# Altium schematic symbol library Connectors.SchLib: 110 symbols (part 2 of 2)
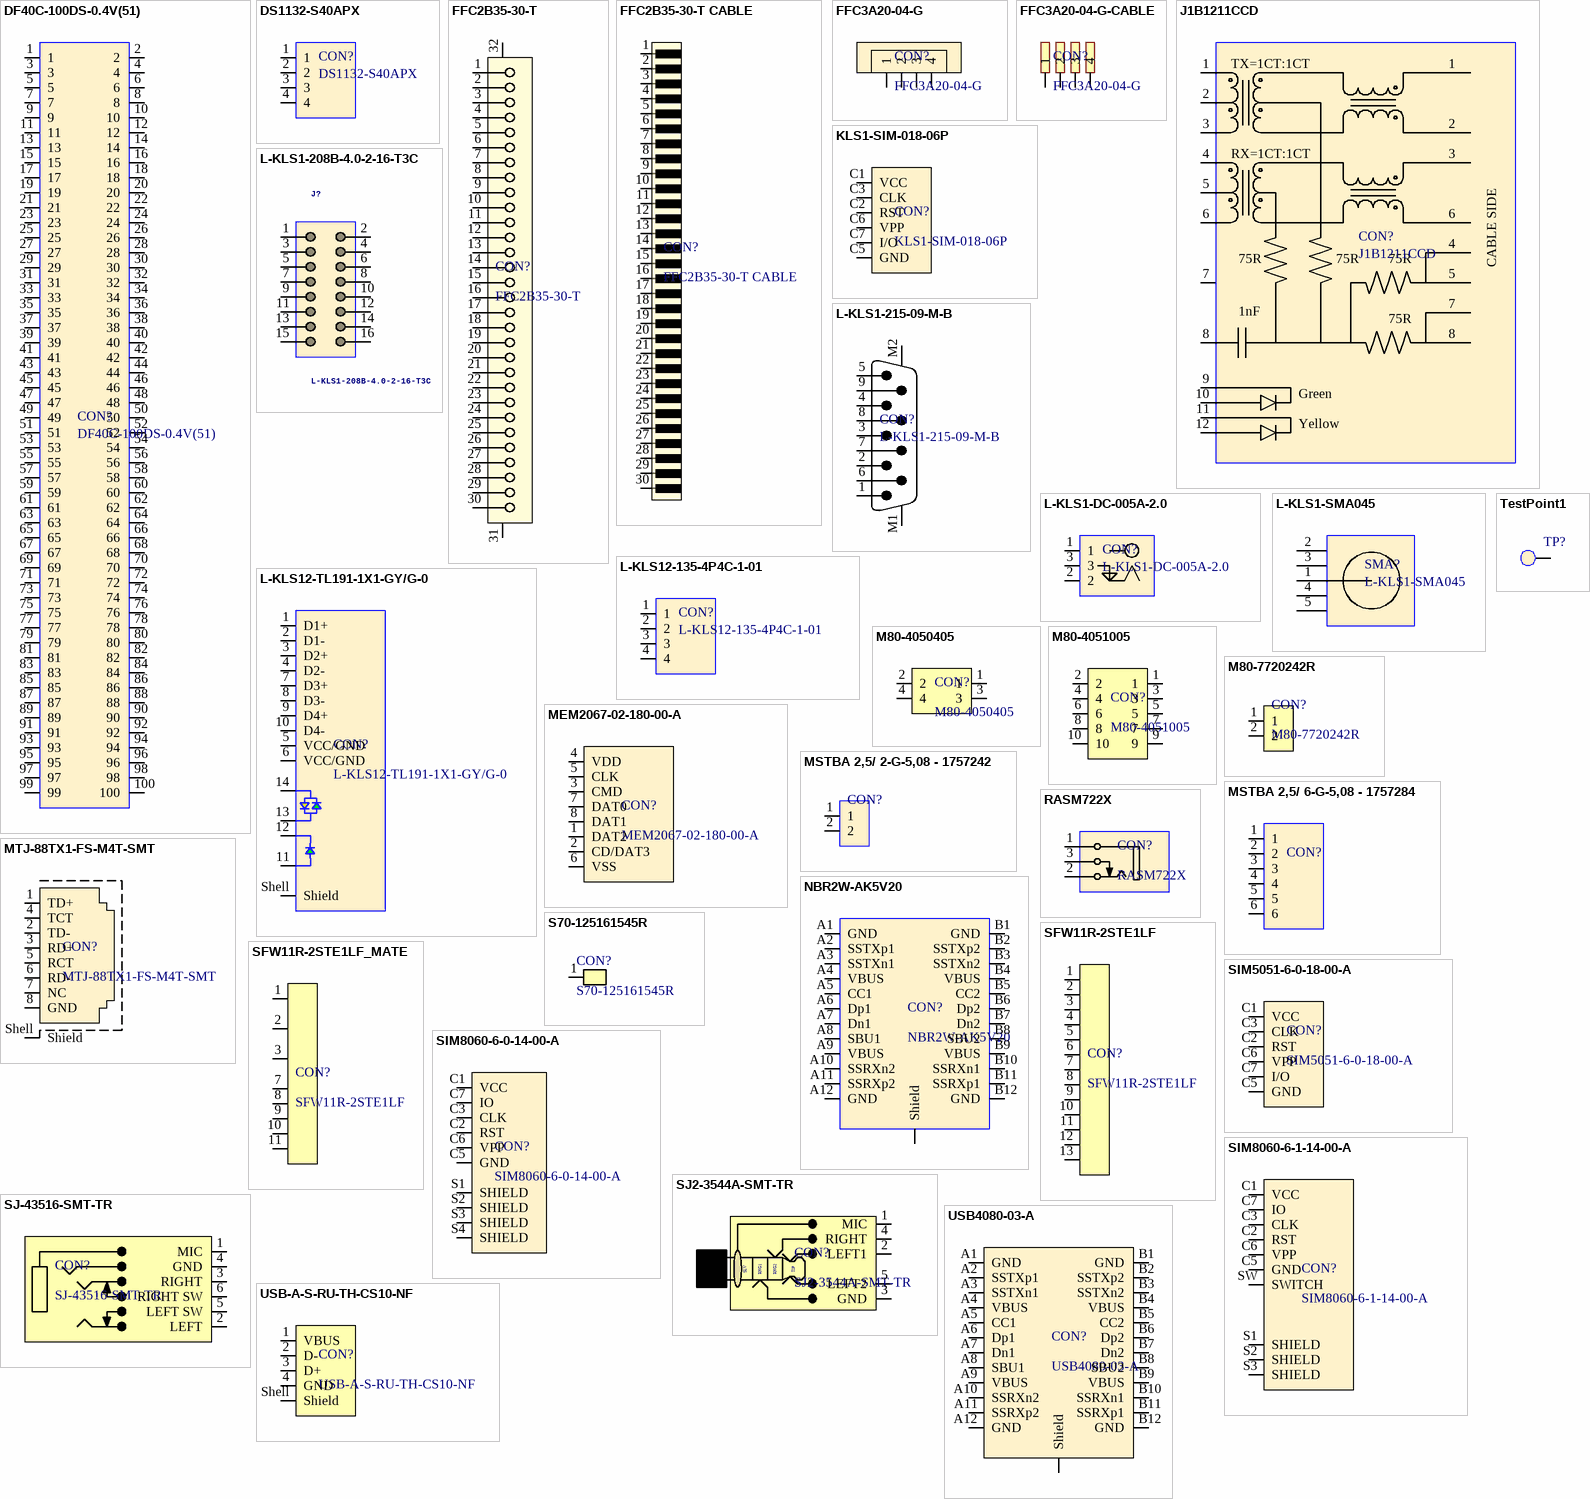
[diagram p3: symbols DF40C-100DS-0.4V(51) to USB-A-S-RU-TH-CS10-NF]

## M80-4050405
designator CON?
2+2 Pos. Female DIL Vertical Throug RoHS Compliant: Yes; Manufacturer: HARWIN; Number of Contacts: 4; Pitch: 2mm; Purpose Of Usage: BASIC; Manufacturer Part Number: M80-4050405; RoHS: Yes; Category: CONNECTORS; Color: Black; Contact Plating: Gold; Gender: FEMALE; Max Operating Temperature: 125°C; Min Operating Temperature: -55°C; Mount: THT; MSL: 1; Orientation: Vertical; Stock ID: ???; Sub-Category: BOARD TO WIRE; Supplier 1: Digi-Key; Supplier Part Number 1: M80-4050405-ND
footprint M80-4050405
pins: 1 (power), 2 (power), 3 (power), 4 (power)

## M80-4051005
designator CON?
5+5 Pos. Female DIL Vertical Throug RoHS Compliant: Yes; Manufacturer: HARWIN; Number of Contacts: 10; Pitch: 2mm; Purpose Of Usage: BASIC; Manufacturer Part Number: M80-4051005; RoHS: Yes; Category: CONNECTORS; Min Operating Temperature: -55°C; Max Operating Temperature: 125°C; Supplier 1: Digi-Key; Supplier Part Number 1: M80-4051005-ND; Color: Black; Contact Plating: Gold; Gender: FEMALE; Mount: THT; MSL: 1; Orientation: Vertical; Stock ID: ???; Sub-Category: BOARD TO WIRE
footprint M80-4051005
pins: 1 (power), 2 (power), 3 (power), 4 (power), 5 (power), 6 (power), 7, 8, 9, 10

## M80-7720242R
designator CON?
Conn, Header, 2Pos, 1Row, 2Mm, Th Rohs Compliant: Yes |Harwin M80-7720242R; Manufacturer: HARWIN; Gender: Male; Number of Contacts: 2; Purpose Of Usage: BASIC; Manufacturer Part Number: M80-7720242R; RoHS: Yes; Category: CONNECTORS; Contact Plating: Gold; Max Operating Temperature: 125°C; Min Operating Temperature: -55°C; Mount: THT; MSL: 1; Orientation: Vertical; Pitch: 2mm; Price 10K: 2.5; Stock ID: ???; Sub-Category: BOARD TO WIRE; Supplier 1: Digi-Key; Supplier Part Number 1: 952-M80-7720242RTR-ND
footprint M80-7720242R
pins: 1 (power), 2 (power)

## MEM2067-02-180-00-A
designator CON?
8 Contact Hinged SMT 1.8 mm Profile Micro SD Card (No Peg No Switch); Manufacturer: Global Connector Technology; Number of Contacts: 8; Purpose Of Usage: BASIC; Supplier 1: Farnell; Manufacturer Part Number: MEM2067-02-180-00-A; RoHS: Yes; Category: CONNECTORS; Contact Plating: Gold; Supplier Part Number 1: 3871971; Mount: SMD; Sub-Category: SD CARD; Local Supplier: FUTURE; Price 10K: 0.42; Stock ID: ??
footprint MEM2067-02-180-00-A_revB (Micro SD Memory Card ConnectorSMT, Hinged, 1.80mm Profile)
pins: 1 DAT2, 2 CD/DAT3, 3 CMD, 4 VDD (power), 5 CLK, 6 VSS (power), 7 DAT0, 8 DAT1

## MSTBA 2,5/ 2-G-5,08 - 1757242
designator CON?, comment MSTBA 2,5/ 2-G-5,08  (value not drawn)
TERM BLOCK HDR 2POS 90DEG 5.08MM; Manufacturer: Phoenix Contact; Manufacturer Part Number: 1757242; Current Rating: 12A; Number of Contacts: 2; Gender: Male; Purpose Of Usage: BASIC; Supplier 1: Digi-Key; Supplier Part Number 1: 277-1106-ND; RoHS: Yes; Mount: THT; Contact Plating: Tin; Color: Grey; Orientation: Right Angle; Length: 12.16mm; Pitch: 5.08mm; Category: CONNECTORS; Sub-Category: TERMINAL BLOCK; Stock ID: ??
footprint TERM BLOCK HDR 2POS 90DEG 5.08MM
pins: 1, 2

## MSTBA 2,5/ 6-G-5,08 - 1757284
designator CON?, comment MSTBA 2,5/ 6-G-5,08  (value not drawn)
TERM BLOCK HDR 6POS 90DEG 5.08MM; Manufacturer: Phoenix Contact; Manufacturer Part Number: 1757284; Gender: Male; Current Rating: 12A; Number of Contacts: 6; Purpose Of Usage: BASIC; Supplier 1: Digi-Key; Supplier Part Number 1: 277-1110-ND; RoHS: Yes; Mount: THT; Contact Plating: Tin; Color: Grey; Orientation: Right Angle; Length: 32.48mm; Pitch: 5.08mm; Category: CONNECTORS; Sub-Category: TERMINAL BLOCK; Stock ID: ??
footprint TERM BLOCK HDR 6POS 90DEG 5.08MM
pins: 1, 2, 3, 4, 5, 6

## MTJ-88TX1-FS-M4T-SMT
designator CON?
Modular Jack, Shielded, Led's, W; Manufacturer: Adam Equipment; Number of Contacts: 8; Purpose Of Usage: BASIC; Supplier 1: Digi-Key; Manufacturer Part Number: MTJ-88TX1-FS-M4T-SMT; RoHS: No; Category: CONNECTORS; Supplier Part Number 1: 2057-MTJ-88TX1-FS-M4T-SMT-ND; Local Supplier: FUTURE; Max Operating Temperature: 85°C; Min Operating Temperature: 0°C; Mount: SMD; Orientation: Right Angle; Price 10K: 0.82; Stock ID: ??; Sub-Category: MODULAR
footprint 7498011008 (LAN Transformer, body 21.95x16.26mm)
pins: 1 TD+, 2 TD-, 3 RD+, 4 TCT, 5 RCT, 6 RD-, 7 NC, 8 GND, Shell Shield

## NBR2W-AK5V20
designator CON?
CONN RCP USB3.1 TYPEC 24P SMD RA; Manufacturer: Advanced-Connectek; Gender: Receptacle; Number of Contacts: 24; Purpose Of Usage: BASIC; Category: CONNECTORS; Manufacturer Part Number: NBR2W-AK5V20; Max Operating Temperature: 85°C; Min Operating Temperature: -55°C; Mount: SMD; Orientation: Right Angle; RoHS: Yes; Sub-Category: USB Type-C; Supplier 1: KAT; Stock ID: ??
footprint NBR2W-AK5V20
pins: A1 GND, A2 SSTXp1, A3 SSTXn1, A4 VBUS, A5 CC1, A6 Dp1, A7 Dn1, A8 SBU1, A9 VBUS, A10 SSRXn2, A11 SSRXp2, A12 GND, B1 GND, B2 SSTXp2, B3 SSTXn2, B4 VBUS, B5 CC2, B6 Dp2, B7 Dn2, B8 SBU2, B9 VBUS, B10 SSRXn1, B11 SSRXp1, B12 GND, Shield

## RASM722X
designator CON?
Connector Power PL 2 POS Solder RA SMD 3 Terminal 1 Port Bulk; Manufacturer: Switchcraft; Contact Metarial: Copper Alloy,Brass; Gender: Male; Current Rating: 5A; Number of Contacts: 2; Purpose Of Usage: BASIC; Supplier 1: Digi-Key; Manufacturer Part Number: RASM722X; RoHS: Yes; Category: CONNECTORS; Mount: SMD; Contact Plating: Tin,Nickel; Color: Black; Sub-Category: JACK; Orientation: Right Angle; Length: 15.2mm; Supplier Part Number 1: RASM722X-ND; Stock ID: ??
footprint SWIT-RASM722X_V (SMD, 3-Leads, Body 14.5x9mm)
pins: 1 SLEEVE, 2 TIP, 3 SHUNT

## S70-125161545R
designator CON?
Conn Accessories Pogo Pin Contact Pad Rectangular Shape SMD Beryllium Copper Gold Over Nickel T/R; Manufacturer: Harwin; Number of Contacts: 1; Purpose Of Usage: BASIC; Supplier 1: Digi-Key; Manufacturer Part Number: S70-125161545R; RoHS: Yes; Contact Plating: Gold; Min Operating Temperature: -40°C; Max Operating Temperature: 180°C; Supplier Part Number 1: 952-3138-1-ND; Category: CONNECTORS; Local Supplier: FUTURE; Mount: SMD; Stock ID: ??; Sub-Category: PAD
footprint S70-125161545R (Pin Header, pitch 2.54 mm, THT, Vertical, single row, 4p)
pins: 1

## SFW11R-2STE1LF
designator CON?
Conn FFC/FPC Connector SKT 11 POS 1mm Solder RA SMD Embossed T/R; Manufacturer: Amphenol ICC / FCI; Current Rating: 1A; Number of Contacts: 11; Purpose Of Usage: BASIC; Manufacturer Part Number: SFW11R-2STE1LF; RoHS: Yes; Category: CONNECTORS; Contact Plating: Tin; Min Operating Temperature: -55°C; Max Operating Temperature: 105°C; Orientation: Right Angle; Length: 16.8mm; Pitch: 1mm; Supplier 1: Digi-Key; Supplier Part Number 1: 609-5397-2-ND; Mount: SMD; Stock ID: ??; Sub-Category: FPC
footprint SFW11R-2STE1LF
pins: 1, 2, 3, 4, 5, 6, 7, 8, 9, 10, 11, 12, 13

## SFW11R-2STE1LF_MATE
designator CON?, comment SFW11R-2STE1LF
Conn FFC/FPC Connector SKT 11 POS 1mm Solder RA SMD Embossed T/R; Manufacturer: Amphenol ICC / FCI; Current Rating: 1A; Number of Contacts: 11; Purpose Of Usage: BASIC; Manufacturer Part Number: SFW11R-2STE1LF; RoHS: Yes; Category: CONNECTORS; Contact Plating: Tin; Min Operating Temperature: -55°C; Max Operating Temperature: 105°C; Orientation: Right Angle; Length: 16.8mm; Pitch: 1mm; Stock ID: ??; Sub-Category: FPC
footprint SFW11R-2STE1LF - Mate
pins: 1, 2, 3, 7, 8, 9, 10, 11

## SIM5051-6-0-18-00-A
designator CON?
Mini Sim Hinged, 6P, SMT, 1.8MM; Manufacturer: Global Connector Technology; Number of Contacts: 6; Purpose Of Usage: BASIC; Supplier 1: Farnell; Manufacturer Part Number: SIM5051-6-0-18-00-A; RoHS: Yes; Category: CONNECTORS; Contact Plating: Gold; Supplier Part Number 1: 2443096; Mount: SMD; Sub-Category: SIM CARD; Local Supplier: FUTURE; Price 10K: 0.308; Stock ID: ??
footprint SIM5051-6-0-18-00-X_revF (SIM Card Connector, Hinged Type, 6 Pin, SMT, 1.85mm Profile)
pins: C1 VCC, C2 RST, C3 CLK, C5 GND, C6 VPP, C7 I/O

## SIM8060-6-0-14-00-A
designator CON?
Nano SIM Hinged, 6P, 1.43mmH, 1µ", No Peg, No Switch, T&R; Manufacturer: Global Connector Technology; Purpose Of Usage: BASIC; Supplier 1: Farnell; Manufacturer Part Number: SIM8060-6-0-14-00-A; RoHS: Yes; Category: CONNECTORS; Supplier Part Number 1: 3873306; Mount: SMD; Sub-Category: SIM CARD; Stock ID: ??
footprint SIM8060-6-0-14-00-A
pins: C1 VCC, C2 RST, C3 CLK, C5 GND, C6 VPP, C7 IO, S1 SHIELD, S2 SHIELD, S3 SHIELD, S4 SHIELD

## SIM8060-6-1-14-00-A
designator CON?
6 Position Right Angle Surface Mount NANO SIM Card Connector; Manufacturer: Global Connector Technology; Purpose Of Usage: BASIC; Supplier 1: Future Electronics; Manufacturer Part Number: SIM8060-6-1-14-00-A; RoHS: No; Category: CONNECTORS; Supplier Part Number 1: 6127031; Mount: SMD; Sub-Category: SIM CARD; Local Supplier: FUTURE; Price 10K: 0.49; Stock ID: ??
footprint SIM8060-6-1-14-00-A
pins: C1 VCC, C2 RST, C3 CLK, C5 GND, C6 VPP, C7 IO, S1 SHIELD, S2 SHIELD, S3 SHIELD, SW SWITCH

## SJ2-3544A-SMT-TR
designator CON?
Manufacturer: CUI Devices; Current Rating: 1A; Gender: Female; Purpose Of Usage: BASIC; Supplier 1: Digi-Key; Manufacturer Part Number: SJ2-3544A-SMT-TR; RoHS: Yes; Category: CONNECTORS; Supplier Part Number 1: CP-SJ2-3544A-SMT-CT-ND; Color: Black; Contact Plating: Silver; Lead Free: Lead Free; Mount: SMD; Orientation: Horizontal; Stock ID: ??; Sub-Category: AUDIO JACK
footprint SJ2-3544A-SMT-TR
pins: 1 MIC, 2 LEFT1, 3 GND, 4 RIGHT, 5 LEFT2
text: SLV; RNG1; RNG2; TIP

## SJ-43516-SMT-TR
designator CON?
3.5 mm, 4 Conductors, Right Angle, Surface Mount (SMT), Audio Jack Connector; Manufacturer: CUI Devices; Gender: Female; Current Rating: 1A; Number of Contacts: 6; Purpose Of Usage: BASIC; Supplier 1: Digi-Key; Manufacturer Part Number: SJ-43516-SMT-TR; RoHS: Yes; Category: CONNECTORS; Contact Plating: Silver; Color: Black; Orientation: Horizontal; Lead Free: Lead Free; Supplier Part Number 1: CP-43516SJTR-ND; Mount: SMD; Sub-Category: AUDIO JACK; Stock ID: ??
footprint SJ-43516-SMT-TR
pins: 1 MIC, 2 LEFT, 3 RIGHT, 4 GND, 5 LEFT SW, 6 RIGHT SW

## TestPoint1
designator TP?  (value not drawn)  (no BOM)
test ölçüm noktası; Manufacturer: NO BOM DEVICE; Purpose Of Usage: BASIC; Category: CONNECTORS; Sub-Category: TEST POINT; Manufacturer Part Number: NO BOM DEVICE; Stock ID: ??
footprint SMD_2mmPoint
footprint Hole_0.5
footprint SMD_1mmPoint
pins: 1

## USB4080-03-A
designator CON?
USB Type C Rec, 3 Horizontal, SMT, Top mnt, 7.9mm body; Manufacturer: Global Connector Technology; Gender: Receptacle; Purpose Of Usage: BASIC; Supplier 1: Future Electronics; Manufacturer Part Number: USB4080-03-A; RoHS: Yes; Category: CONNECTORS; Supplier Part Number 1: 5146382; Orientation: Right Angle; Sub-Category: USB Type-C; Mount: SMD; Local Supplier: FUTURE; Price 10K: 0.463; Stock ID: ??
footprint GCT_USB4080-03-A_REVA1
pins: A1 GND, A2 SSTXp1, A3 SSTXn1, A4 VBUS, A5 CC1, A6 Dp1, A7 Dn1, A8 SBU1, A9 VBUS, A10 SSRXn2, A11 SSRXp2, A12 GND, B1 GND, B2 SSTXp2, B3 SSTXn2, B4 VBUS, B5 CC2, B6 Dp2, B7 Dn2, B8 SBU2, B9 VBUS, B10 SSRXn1, B11 SSRXp1, B12 GND, G Shield

## USB-A-S-RU-TH-CS10-NF
designator CON?
USB 2.0 Type A Receptacle WR-COM, Up Right, THT, Short Type USB-A-S-RU-TH-CS10-NF; Manufacturer: ADAM TECH; Number of Contacts: 4; Purpose Of Usage: BASIC; Supplier 1: Future Electronics; Manufacturer Part Number: USB-A-S-RU-TH-CS10-NF; RoHS: Yes; Category: CONNECTORS; Contact Plating: Gold; Min Operating Temperature: -40°C; Max Operating Temperature: 85°C; Gender: Receptacle; Orientation: Right Angle; Supplier Part Number 1: USB-A-S-RU-TH-CS10-NF; Local Supplier: FUTURE; Mount: THT; Stock ID: ??; Sub-Category: USB; Price 10K: 0.27
footprint 614004184726 (USB 2.0 Type A Up Right THT)
pins: 1 VBUS, 2 D-, 3 D+, 4 GND, Shell Shield